# Altium footprint library LimeMicroAltiumLib.PcbLib: 876 footprints (part 33 of 57)
Each footprint in its own frame and in the unit in brackets; x right, y up, seen from the top. Pads: shape width x height; smd on the part's side, far side on the other; paste and mask are expansions set on the pad; w line width, h text height; cw(c..) or ccw(c..) is an arc to the next point about the centre after c.
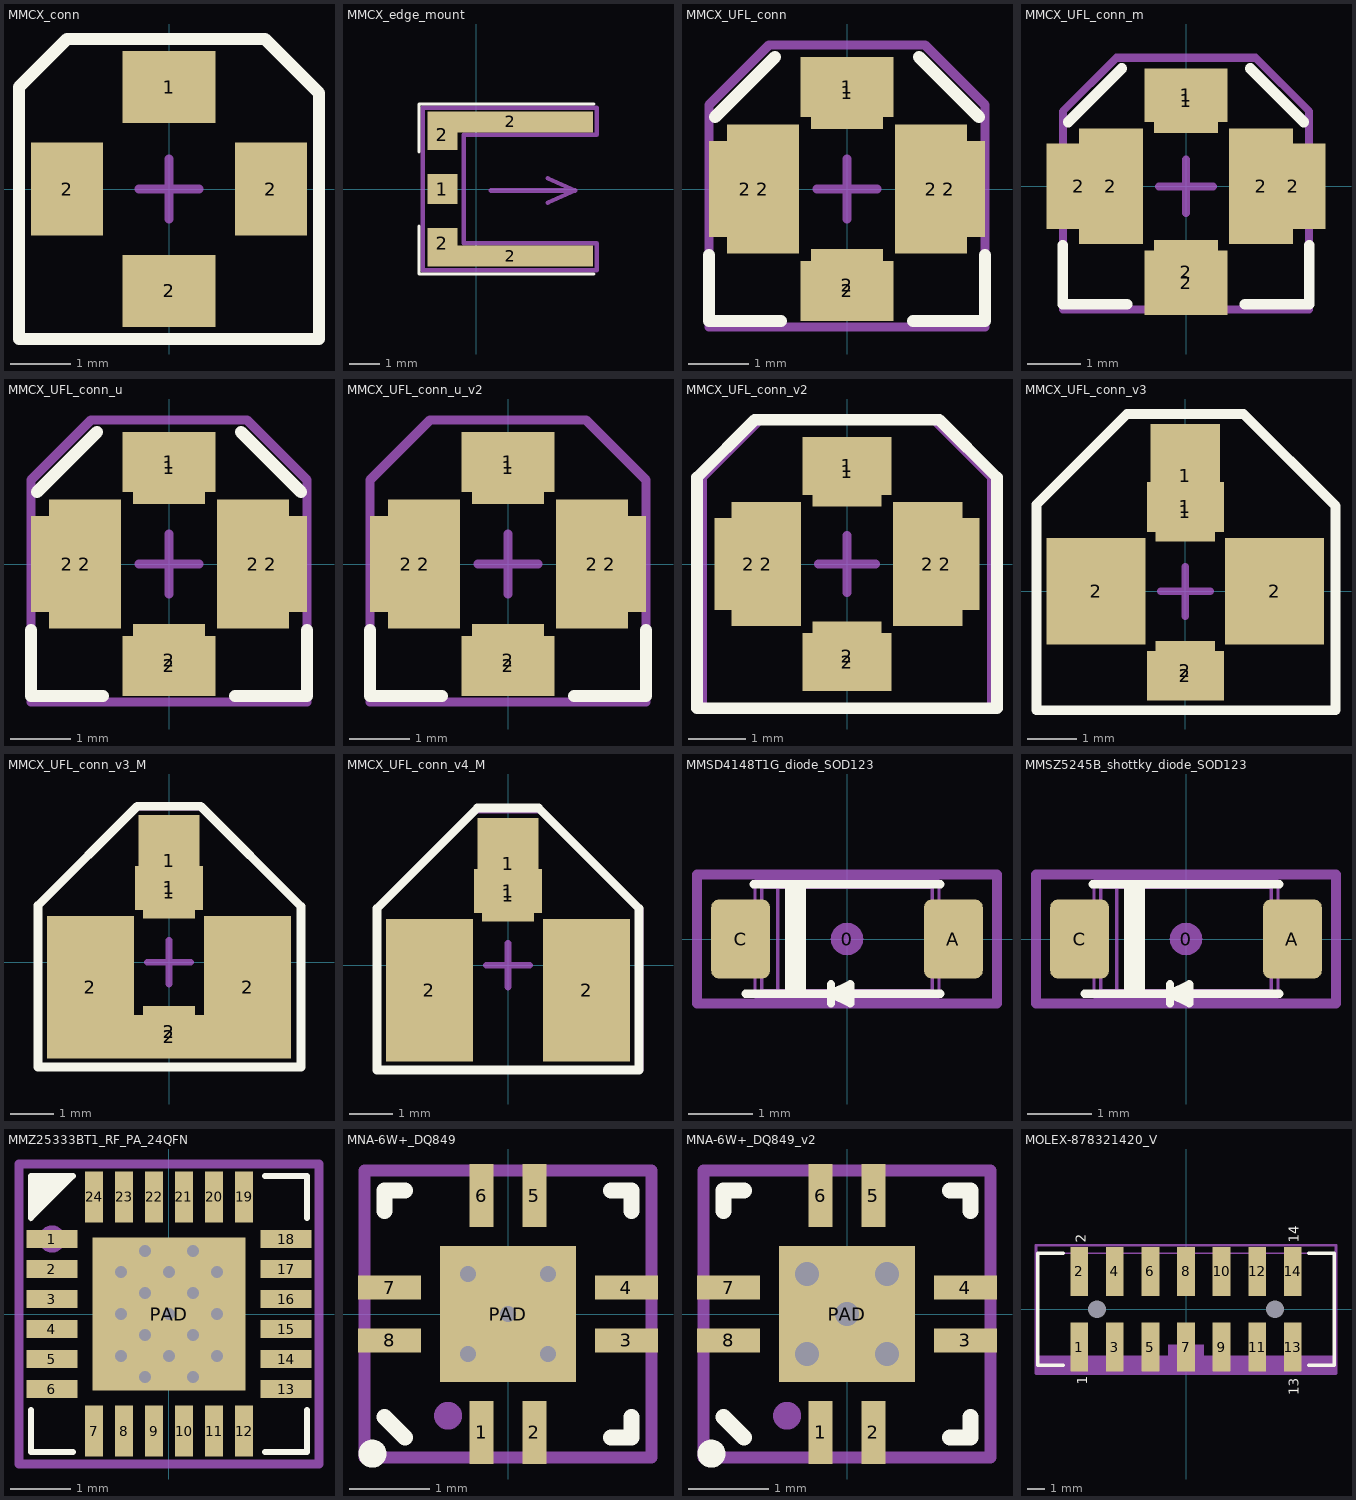
[diagram p32: the footprints below, top view; thin cyan lines are the x and y axes]

## MMCX_conn [mm]
pads (4):
  rect 1.55x1.2 smd: 1(0,1.7) 2(0,-1.7)
  rect 1.2x1.55 smd: 2(-1.7,0) 2(1.7,0)
Top Overlay:
  lines w0.2: -2.5,-2.5 2.5,-2.5 2.5,1.6 1.6,2.5 -1.7,2.5 -2.5,1.7 -2.5,-2.5
Mechanical 15:
  lines w0.15: -0.5,0 0.5,0 ; 0,-0.5 0,0.5 ; -2.5,-2.5 -2.5,1.7 -1.7,2.5 1.6,2.5 2.5,1.6 2.5,-2.5 -2.5,-2.5
  text ".designator" at 0,0 h0.55
  text "in" at -0.4,1.4 h0.4
  text "GND" at -1.3,-0.5 h0.4
  text "GND" at -0.35,-1.675 h0.4
  text "GND" at 1.6,-0.5 h0.4
3D body "User Library-Molex_MMCX_734152061.step": height 5, standoff 0, extent -2.475,-2.475 2.475,2.475

## MMCX_edge_mount [mm]
pads (5):
  rect 1x1 smd mask+0.05: 1(-1.125,0) 2(-1.125,-1.8) 2(-1.125,1.8)
  rect 5.5x0.7 smd mask+0.05: 2(1.125,-2.225) 2(1.125,2.225)
Top Overlay:
  lines w0.1: -1.9,-1.225 -1.9,-2.825 3.9,-2.825 ; -1.9,1.225 -1.9,2.825 3.9,2.825
Mechanical 15:
  lines w0.15: 0.475,-0.05 3.275,-0.05 ; 2.375,-0.45 3.275,-0.05 ; 2.375,0.35 3.275,-0.05 ; -1.775,-2.7 4,-2.7 4,-1.8 -0.425,-1.8 -0.425,1.8 4,1.8 4,2.7 -1.775,2.7 -1.775,-2.7
  text "PCB cutout" at 0.175,1.15 h0.4
  text ".Designator" at -1.15,-0.05 h0.55
  text "in" at -1.1,-0.3 h0.4
  text "GND" at -1.5,-2.5 h0.4
  text "GND" at -1.5,2.1 h0.4
3D body "MMCX_CONN_90.STEP": height 2.1, standoff -1.41, extent -1.6,-2.235 3.85,2.235

## MMCX_UFL_conn [mm]
pads (8):
  rect 1.2x1.2 smd mask+0.05: 1(0,1.6) 2(0,-1.6)
  rect 1.55x1 smd mask+0.05: 1(0,1.7) 2(0,-1.7)
  rect 1.2x1.6 smd mask+0.05: 2(-1.7,0) 2(1.7,0)
  rect 1.2x2.15 smd mask+0.05: 2(-1.4,0) 2(1.4,0)
Top Overlay:
  lines w0.2: -2.3,-1.1 -2.3,-2.2 -1.1,-2.2 ; -2.2,1.2 -1.2,2.2 ; 1.1,-2.2 2.3,-2.2 2.3,-1.1 ; 1.2,2.2 2.2,1.2
Top Solder:
  region: -0.825,1.2 -0.575,1.2 -0.575,0.95 -0.825,0.95
  region: 0.825,1.2 0.575,1.2 0.575,0.95 0.825,0.95
  region: 0.825,-0.95 0.575,-0.95 0.575,-1.2 0.825,-1.2
  region: -0.575,-0.95 -0.825,-0.95 -0.825,-1.2 -0.575,-1.2
Mechanical 15:
  lines w0.15: -0.5,0 0.5,0 ; 0,-0.5 0,0.5 ; -2.3,-2.3 -2.3,1.4 -1.3,2.4 1.3,2.4 2.3,1.4 2.3,-2.3 -2.3,-2.3
  text "GND" at 1.6,-0.5 h0.4
  text "GND" at -0.35,-1.675 h0.4
  text "GND" at -1.3,-0.5 h0.4
  text "in" at -0.4,1.4 h0.4
  text ".designator" at 0,0 h0.55
3D body "User Library-Molex_MMCX_734152061.step": height 5, standoff 0, extent -2.475,-2.475 2.475,2.475
3D body "User Library-U_FL-R-SMT-1.step": height 1.25, standoff -0.01, extent -1.5,-1.55 1.5,1.55

## MMCX_UFL_conn_m [mm]
pads (8):
  rect 1.2x1.2 smd mask+0.05: 1(0,1.6) 2(0,-1.6)
  rect 1.55x1 smd mask+0.05: 1(0,1.7)
  rect 1.2x1.6 smd mask+0.05: 2(-2,0) 2(2,0)
  rect 1.2x2.15 smd mask+0.05: 2(-1.4,0) 2(1.4,0)
  rect 1.55x1.2 smd mask+0.05: 2(0,-1.8)
Top Overlay:
  lines w0.2: -2.3,-1.1 -2.3,-2.2 -1.1,-2.2 ; -2.2,1.2 -1.2,2.2 ; 1.1,-2.2 2.3,-2.2 2.3,-1.1 ; 1.2,2.2 2.2,1.2
Top Solder:
  region: -0.575,-0.95 -0.825,-0.95 -0.825,-1.2 -0.575,-1.2
  region: 0.825,-0.95 0.575,-0.95 0.575,-1.2 0.825,-1.2
  region: 0.825,1.2 0.575,1.2 0.575,0.95 0.825,0.95
  region: -0.825,1.2 -0.575,1.2 -0.575,0.95 -0.825,0.95
Mechanical 15:
  lines w0.15: -0.5,0 0.5,0 ; 0,-0.5 0,0.5 ; -2.3,-2.3 -2.3,1.4 -1.3,2.4 1.3,2.4 2.3,1.4 2.3,-2.3 -2.3,-2.3
  text "GND" at 1.6,-0.5 h0.4
  text "GND" at -0.35,-1.675 h0.4
  text "GND" at -1.3,-0.5 h0.4
  text ".designator" at 0,0 h0.55
  text "in" at -0.4,1.4 h0.4
3D body "908-22101T--3DModel-STEP-56544.STEP": height 3.61, standoff 0, extent -2.134,-2.159 2.184,2.159

## MMCX_UFL_conn_u [mm]
pads (8):
  rect 1.2x1.2 smd mask+0.05: 1(0,1.6) 2(0,-1.6)
  rect 1.55x1 smd mask+0.05: 1(0,1.7) 2(0,-1.7)
  rect 1.2x1.6 smd mask+0.05: 2(-1.7,0) 2(1.7,0)
  rect 1.2x2.15 smd mask+0.05: 2(-1.4,0) 2(1.4,0)
Top Overlay:
  lines w0.2: -2.3,-1.1 -2.3,-2.2 -1.1,-2.2 ; -2.2,1.2 -1.2,2.2 ; 1.1,-2.2 2.3,-2.2 2.3,-1.1 ; 1.2,2.2 2.2,1.2
Top Solder:
  region: -0.575,-0.95 -0.825,-0.95 -0.825,-1.2 -0.575,-1.2
  region: 0.825,-0.95 0.575,-0.95 0.575,-1.2 0.825,-1.2
  region: 0.825,1.2 0.575,1.2 0.575,0.95 0.825,0.95
  region: -0.825,1.2 -0.575,1.2 -0.575,0.95 -0.825,0.95
Mechanical 15:
  lines w0.15: -0.5,0 0.5,0 ; 0,-0.5 0,0.5 ; -2.3,-2.3 2.3,-2.3 2.3,1.4 1.3,2.4 -1.3,2.4 -2.3,1.4 -2.3,-2.3
  text ".designator" at 0,0 h0.55
  text "in" at -0.4,1.4 h0.4
  text "GND" at -1.3,-0.5 h0.4
  text "GND" at -0.35,-1.675 h0.4
  text "GND" at 1.6,-0.5 h0.4
3D body "User Library-U_FL-R-SMT-1.step": height 1.25, standoff -0.01, extent -1.5,-1.55 1.5,1.55

## MMCX_UFL_conn_u_v2 [mm] "Less silkscreen"
pads (8):
  rect 1.2x1.2 smd mask+0.05: 1(0,1.6) 2(0,-1.6)
  rect 1.55x1 smd mask+0.05: 1(0,1.7) 2(0,-1.7)
  rect 1.2x1.6 smd mask+0.05: 2(-1.7,0) 2(1.7,0)
  rect 1.2x2.15 smd mask+0.05: 2(-1.4,0) 2(1.4,0)
Top Overlay:
  lines w0.2: -2.3,-1.1 -2.3,-2.2 -1.1,-2.2 ; 1.1,-2.2 2.3,-2.2 2.3,-1.1
Top Solder:
  region: -0.825,1.2 -0.575,1.2 -0.575,0.95 -0.825,0.95
  region: 0.825,1.2 0.575,1.2 0.575,0.95 0.825,0.95
  region: 0.825,-0.95 0.575,-0.95 0.575,-1.2 0.825,-1.2
  region: -0.575,-0.95 -0.825,-0.95 -0.825,-1.2 -0.575,-1.2
Mechanical 15:
  lines w0.15: -0.5,0 0.5,0 ; 0,-0.5 0,0.5 ; -2.3,-2.3 2.3,-2.3 2.3,1.4 1.3,2.4 -1.3,2.4 -2.3,1.4 -2.3,-2.3
  text ".designator" at 0,0 h0.55
  text "in" at -0.4,1.4 h0.4
  text "GND" at -1.3,-0.5 h0.4
  text "GND" at -0.35,-1.675 h0.4
  text "GND" at 1.6,-0.5 h0.4
3D body "User Library-U_FL-R-SMT-1.step": height 1.25, standoff -0.01, extent -1.5,-1.55 1.5,1.55

## MMCX_UFL_conn_v2 [mm]
pads (8):
  rect 1.2x1.2 smd mask+0.05: 1(0,1.6) 2(0,-1.6)
  rect 1.55x1 smd mask+0.05: 1(0,1.7) 2(0,-1.7)
  rect 1.2x1.6 smd mask+0.05: 2(-1.7,0) 2(1.7,0)
  rect 1.2x2.15 smd mask+0.05: 2(-1.4,0) 2(1.4,0)
Top Overlay:
  lines w0.2: -2.6,-2.5 -2.6,1.5 -1.6,2.5 1.6,2.5 2.6,1.5 2.6,-2.5 -2.6,-2.5
Top Solder:
  region: -0.825,1.2 -0.575,1.2 -0.575,0.95 -0.825,0.95
  region: 0.825,1.2 0.575,1.2 0.575,0.95 0.825,0.95
  region: 0.825,-0.95 0.575,-0.95 0.575,-1.2 0.825,-1.2
  region: -0.575,-0.95 -0.825,-0.95 -0.825,-1.2 -0.575,-1.2
Mechanical 15:
  lines w0.15: -0.5,0 0.5,0 ; 0,-0.5 0,0.5 ; -2.5,-2.5 2.5,-2.5 2.5,1.5 1.5,2.5 -1.5,2.5 -2.5,1.5 -2.5,-2.5
  text ".designator" at 0,0 h0.55
  text "in" at -0.4,1.4 h0.4
  text "GND" at -1.3,-0.5 h0.4
  text "GND" at -0.35,-1.675 h0.4
  text "GND" at 1.6,-0.5 h0.4
3D body "User Library-Molex_MMCX_734152061.step": height 5, standoff 0, extent -2.475,-2.475 2.475,2.475
3D body "User Library-U_FL-R-SMT-1.step": height 1.25, standoff -0.01, extent -1.5,-1.55 1.5,1.55

## MMCX_UFL_conn_v3 [mm]
pads (7):
  rect 1.2x1.2 smd mask+0.05: 1(0,1.6) 2(0,-1.6)
  rect 1.55x1 smd mask+0.05: 1(0,1.7) 2(0,-1.7)
  rect 1.4x2.1 smd mask+0.05: 1(0,2.325)
  rect 2x2.15 smd mask+0.05: 2(-1.8,0) 2(1.8,0)
Top Overlay:
  lines w0.2: -3,-2.4 3.025,-2.4 3.025,1.725 1.175,3.575 -1.175,3.575 -3,1.75 -3,-2.4
Top Solder:
  region: -0.825,1.2 -0.575,1.2 -0.575,0.95 -0.825,0.95
  region: 0.825,1.2 0.575,1.2 0.575,0.95 0.825,0.95
  region: 0.825,-0.95 0.575,-0.95 0.575,-1.2 0.825,-1.2
  region: -0.575,-0.95 -0.825,-0.95 -0.825,-1.2 -0.575,-1.2
Mechanical 15:
  lines w0.15: -0.5,0 0.5,0 ; 0,-0.5 0,0.5 ; -3,-2.4 -3,1.75 -1.2,3.55 1.2,3.55 3.025,1.725 3.025,-2.4 -3,-2.4
  text "GND" at 1.6,-0.5 h0.4
  text "GND" at -0.35,-1.675 h0.4
  text "GND" at -1.3,-0.5 h0.4
  text "in" at -0.4,1.4 h0.4
  text ".designator" at 0,0 h0.55
3D body "12078.stp": height 5, standoff 0, extent -2.5,-1.55 2.5,3.45
3D body "User Library-U_FL-R-SMT-1.step": height 1.25, standoff -0.01, extent -1.5,-1.55 1.5,1.55
3D body "User Library-Molex_MMCX_734152061.step": height 5, standoff 0, extent -2.475,-2.475 2.475,2.475

## MMCX_UFL_conn_v3_M [mm]
pads (7):
  rect 1.2x1.2 smd mask+0.05: 1(0,1.6) 2(0,-1.6)
  rect 1.55x1 smd mask+0.05: 1(0,1.7)
  rect 1.4x2.1 smd mask+0.05: 1(0,2.325)
  rect 2x3.275 smd mask+0.05: 2(-1.8,-0.575) 2(1.8,-0.575)
  rect 1.6x1 smd mask+0.05: 2(0,-1.713)
Top Overlay:
  lines w0.2: -3,-2.4 -3,1.3 -0.725,3.575 0.725,3.575 3.025,1.275 3.025,-2.4 -3,-2.4
Top Solder:
  region: -0.575,-0.95 -0.825,-0.95 -0.825,-1.2 -0.575,-1.2
  region: 0.825,-0.95 0.575,-0.95 0.575,-1.2 0.825,-1.2
  region: 0.825,1.2 0.575,1.2 0.575,0.95 0.825,0.95
  region: -0.825,1.2 -0.575,1.2 -0.575,0.95 -0.825,0.95
Mechanical 15:
  lines w0.15: -0.5,0 0.5,0 ; 0,-0.5 0,0.5 ; -3,-2.4 3.025,-2.4 3.025,1.275 0.75,3.55 -0.75,3.55 -3,1.3 -3,-2.4
  text "GND" at 1.6,-0.5 h0.4
  text "GND" at -0.35,-1.675 h0.4
  text "GND" at -1.3,-0.5 h0.4
  text "in" at -0.4,1.4 h0.4
  text ".designator" at 0,0 h0.55
3D body "12078.stp": height 5, standoff 0, extent -2.5,-2.425 2.5,2.575

## MMCX_UFL_conn_v4_M [mm]
pads (5):
  rect 1.2x1.2 smd mask+0.05: 1(0,1.6)
  rect 1.55x1 smd mask+0.05: 1(0,1.7)
  rect 1.4x2.1 smd mask+0.05: 1(0,2.325)
  rect 2x3.275 smd mask+0.05: 2(-1.8,-0.575) 2(1.8,-0.575)
Top Overlay:
  lines w0.2: -3,-2.4 0,-2.4 3,-2.4 3,1.3 0.7,3.6 -0.7,3.6 -3,1.3 -3,-2.4
Top Solder:
  region: 0.825,1.2 0.575,1.2 0.575,0.95 0.825,0.95
  region: -0.825,1.2 -0.575,1.2 -0.575,0.95 -0.825,0.95
Mechanical 15:
  lines w0.15: -0.5,0 0.5,0 ; 0,-0.5 0,0.5 ; -3,-2.4 3.025,-2.4 3.025,1.275 0.75,3.55 -0.75,3.55 -3,1.3 -3,-2.4
  text ".designator" at 0,0 h0.55
  text "in" at -0.4,1.4 h0.4
  text "GND" at -1.3,-0.5 h0.4
  text "GND" at 1.6,-0.5 h0.4
3D body "12078.stp": height 5, standoff 0, extent -2.5,-2.425 2.5,2.575

## MMSD4148T1G_diode_SOD123 [mm]
height 1.15
pads (3):
  round 0.508 on Mech15: 0(0,0)
  rrect25% 0.91x1.22 smd: A(1.65,0) C(-1.65,0)
Top Overlay:
  lines w0.127: -1.575,-0.85 1.448,-0.85 ; -1.45,0.85 1.45,0.85 ; -0.9,-0.85 -0.9,0.85 ; -0.8,-0.85 -0.8,0.85 ; -0.7,-0.85 -0.7,0.85 ; -0.25,-1 -0.25,-0.7 ; 0.05,-0.85 -0.25,-0.85 ; -0.25,-0.85 0.05,-0.7 0.05,-1 -0.25,-0.85
Mechanical 13:
  lines w0.05: -1.766,-0.308 -1.766,0.308 ; -1.707,-0.308 -1.707,0.308 ; -1.517,-0.308 -1.517,0.308 ; -1.425,-0.308 -1.95,-0.308 -1.95,0.308 -1.425,0.308 ; 0.075,-0.9 0.177,-0.798 ; 1.425,-0.308 1.95,-0.308 1.95,0.308 1.425,0.308 ; 1.517,-0.308 1.517,0.308 ; 1.707,-0.308 1.707,0.308 ; 1.766,-0.308 1.766,0.308 ; -1.425,0.9 -1.425,-0.9 1.425,-0.9 ; -1.425,0.9 1.425,0.9 ; -1.425,0.9 -1.323,0.798 ; -1.323,0.798 -1.323,-0.798 -1.072,-0.798 ; -1.323,0.798 -1.072,0.798 ; -1.072,-0.798 -1.072,0.798 ; -1.072,-0.798 1.322,-0.797 ; -1.072,0.798 1.322,0.797 ; 1.322,-0.797 1.425,-0.9 ; 1.322,-0.797 1.322,0.797 ; 1.322,0.797 1.425,0.9 ; 1.425,-0.9 1.425,0.9
Mechanical 15:
  lines w0.15: -2.325,-1 -2.325,1 2.325,1 2.325,-1 -2.325,-1
  text ".Designator" at 0,0 h0.55
  text "C" at -1.9,-0.275 h0.55
  text "A" at 1.475,-0.275 h0.55
3D body "SOD123.STEP": height 1.18, standoff 0, extent -1.95,-0.9 1.95,0.9

## MMSZ5245B_shottky_diode_SOD123 [mm]
height 1.15
pads (3):
  round 0.508 on Mech15: 0(0,0)
  rrect25% 0.91x1.22 smd: A(1.65,0) C(-1.65,0)
Top Overlay:
  lines w0.127: -1.575,-0.85 1.448,-0.85 ; -1.45,0.85 1.45,0.85 ; -0.9,-0.85 -0.9,0.85 ; -0.8,-0.85 -0.8,0.85 ; -0.7,-0.85 -0.7,0.85 ; -0.25,-1 -0.25,-0.7 ; 0.05,-0.85 -0.25,-0.85 ; -0.25,-0.85 0.05,-0.7 0.05,-1 -0.25,-0.85
Mechanical 13:
  lines w0.05: -1.766,-0.308 -1.766,0.308 ; -1.707,-0.308 -1.707,0.308 ; -1.517,-0.308 -1.517,0.308 ; -1.425,-0.308 -1.95,-0.308 -1.95,0.308 -1.425,0.308 ; 0.075,-0.9 0.177,-0.798 ; 1.425,-0.308 1.95,-0.308 1.95,0.308 1.425,0.308 ; 1.517,-0.308 1.517,0.308 ; 1.707,-0.308 1.707,0.308 ; 1.766,-0.308 1.766,0.308 ; -1.425,0.9 -1.425,-0.9 1.425,-0.9 ; -1.425,0.9 1.425,0.9 ; -1.425,0.9 -1.323,0.798 ; -1.323,0.798 -1.323,-0.798 -1.072,-0.798 ; -1.323,0.798 -1.072,0.798 ; -1.072,-0.798 -1.072,0.798 ; -1.072,-0.798 1.322,-0.797 ; -1.072,0.798 1.322,0.797 ; 1.322,-0.797 1.425,-0.9 ; 1.322,-0.797 1.322,0.797 ; 1.322,0.797 1.425,0.9 ; 1.425,-0.9 1.425,0.9
Mechanical 15:
  lines w0.15: -2.325,-1 -2.325,1 2.325,1 2.325,-1 -2.325,-1
  text ".Designator" at 0,0 h0.55
  text "C" at -1.9,-0.275 h0.55
  text "A" at 1.475,-0.275 h0.55
3D body "SOD123.STEP": height 1.18, standoff 0, extent -1.95,-0.9 1.95,0.9

## MMZ25333BT1_RF_PA_24QFN [mm]
pads (25):
  rect 0.85x0.3 smd mask+0.05: 1(-1.95,1.25) 2(-1.95,0.75) 3(-1.95,0.25) 4(-1.95,-0.25) 5(-1.95,-0.75) 6(-1.95,-1.25) 13(1.95,-1.25) 14(1.95,-0.75) 15(1.95,-0.25) 16(1.95,0.25) 17(1.95,0.75) 18(1.95,1.25)
  rect 0.3x0.85 smd mask+0.05: 7(-1.25,-1.95) 8(-0.75,-1.95) 9(-0.25,-1.95) 10(0.25,-1.95) 11(0.75,-1.95) 12(1.25,-1.95) 19(1.25,1.95) 20(0.75,1.95) 21(0.25,1.95) 22(-0.25,1.95) 23(-0.75,1.95) 24(-1.25,1.95)
  rect 2.55x2.55 smd mask+0.05: PAD(0,0)
via 0.4,-0.35 diameter 0.4 hole 0.2
via 0.4,0.35 diameter 0.4 hole 0.2
via 0.4,1.05 diameter 0.4 hole 0.2
via 0.4,-1.05 diameter 0.4 hole 0.2
via 0.8,0.7 diameter 0.4 hole 0.2
via 0.8,-0.7 diameter 0.4 hole 0.2
via 0.8,0 diameter 0.4 hole 0.2
via -0.8,0 diameter 0.4 hole 0.2
via -0.8,-0.7 diameter 0.4 hole 0.2
via -0.8,0.7 diameter 0.4 hole 0.2
via -0.4,-1.05 diameter 0.4 hole 0.2
via -0.4,1.05 diameter 0.4 hole 0.2
via -0.4,0.35 diameter 0.4 hole 0.2
via 0,0.7 diameter 0.4 hole 0.2
via 0,-0.7 diameter 0.4 hole 0.2
via -0.4,-0.35 diameter 0.4 hole 0.2
via 0,0 diameter 0.4 hole 0.2
Top Overlay:
  region: -2.3,1.55 -1.55,2.3 -2.3,2.3
  lines w0.1: -2.3,-1.6 -2.3,-2.3 -1.6,-2.3 ; 1.6,-2.3 2.3,-2.3 2.3,-1.6 ; 1.6,2.3 2.3,2.3 2.3,1.6 ; -2.3,1.6 -2.3,2.3 -1.6,2.3 -2.3,1.6
Mechanical 15:
  circle w0.25: c-1.95,1.25 r0.1
  lines w0.15: -0.5,0 0.5,0 ; 0,-0.5 0,0.5 ; -2.5,-2.5 2.5,-2.5 2.5,2.5 -2.5,2.5 -2.5,-2.5
  text ".Designator" at 0,0 h0.55
3D body "User Library-QFN 24 4x4.step": height 0.9, standoff 0, extent -2.002,-2.002 2.002,2.002

## MNA-6W+_DQ849 [mm] "Quad Flat No Lead, Plastic; 16 Terminals; Body 3 x 3 mm; Pitch 0.5 mm"
height 0.8
pads (9):
  rect 0.3x0.79 smd mask+0.05: 1(-0.33,-1.485) 2(0.33,-1.485) 5(0.33,1.485) 6(-0.33,1.485)
  rect 0.79x0.3 smd mask+0.05: 3(1.485,-0.33) 4(1.485,0.33) 7(-1.485,0.33) 8(-1.485,-0.33)
  rect 1.7x1.7 smd mask+0.05: PAD(0,0)
via -0.5,-0.5 diameter 0.5 hole 0.2
via 0.5,-0.5 diameter 0.5 hole 0.2
via 0.5,0.5 diameter 0.5 hole 0.2
via -0.5,0.5 diameter 0.5 hole 0.2
via 0,0 diameter 0.5 hole 0.2
Top Overlay:
  circle w0.25: c-1.7,-1.75 r0.05
  lines w0.2: -1.55,-1.29 -1.29,-1.55 ; -1.55,1.29 -1.55,1.55 -1.29,1.55 ; 1.29,-1.55 1.55,-1.55 1.55,-1.29 ; 1.29,1.55 1.55,1.55 1.55,1.29
Mechanical 15:
  circle w0.3: c-0.75,-1.275 r0.025
  lines w0.15: -0.475,0 0,0 ; 0,-0.475 0,0 ; 0,0.475 0,0 ; 0.475,0 0,0 ; -1.8,-1.8 1.8,-1.8 1.8,1.8 -1.8,1.8 -1.8,-1.8
  text ".Designator" at 0,0 h0.55
3D body "User Library-QFN16-1.step": height 0.89, standoff 0, extent -1.55,-1.55 1.55,1.55

## MNA-6W+_DQ849_v2 [mm] "Quad Flat No Lead, Plastic; 16 Terminals; Body 3 x 3 mm; Pitch 0.5 mm"
height 0.8
pads (9):
  rect 0.3x0.79 smd mask+0.05: 1(-0.33,-1.485) 2(0.33,-1.485) 5(0.33,1.485) 6(-0.33,1.485)
  rect 0.79x0.3 smd mask+0.05: 3(1.485,-0.33) 4(1.485,0.33) 7(-1.485,0.33) 8(-1.485,-0.33)
  rect 1.7x1.7 smd mask+0.05: PAD(0,0)
via 0,0 diameter 0.5 hole 0.3
via -0.5,0.5 diameter 0.5 hole 0.3
via 0.5,0.5 diameter 0.5 hole 0.3
via 0.5,-0.5 diameter 0.5 hole 0.3
via -0.5,-0.5 diameter 0.5 hole 0.3
Top Overlay:
  circle w0.25: c-1.7,-1.75 r0.05
  lines w0.2: -1.55,-1.29 -1.29,-1.55 ; -1.55,1.29 -1.55,1.55 -1.29,1.55 ; 1.29,-1.55 1.55,-1.55 1.55,-1.29 ; 1.29,1.55 1.55,1.55 1.55,1.29
Mechanical 15:
  circle w0.3: c-0.75,-1.275 r0.025
  lines w0.15: -0.475,0 0,0 ; 0,-0.475 0,0 ; 0,0.475 0,0 ; 0.475,0 0,0 ; -1.8,-1.8 -1.8,1.8 1.8,1.8 1.8,-1.8 -1.8,-1.8
  text ".Designator" at 0,0 h0.55
3D body "User Library-QFN16-1.step": height 0.89, standoff 0, extent -1.55,-1.55 1.55,1.55

## MOLEX-878321420_V [mm] "SMD, 14-Leads, Body 16.65x6.3mm, Pitch 2mm"
height 7.6
pads (16):
  rect 1x2.75 smd: 1(-6,-2.125) 2(-6,2.125) 3(-4,-2.125) 4(-4,2.125) 5(-2,-2.125) 6(-2,2.125) 7(0,-2.125) 8(0,2.125) 9(2,-2.125) 10(2,2.125) 11(4,-2.125) 12(4,2.125) 13(6,-2.125) 14(6,2.125)
  round 0.5 hole 1 unplated: MH1(-5,0) MH2(5,0)
Top Overlay:
  lines w0.2: -6.9,-3.15 -8.325,-3.15 -8.325,3.15 -6.9,3.15 ; 6.9,-3.15 8.325,-3.15 8.325,3.15 6.9,3.15
  text "1" at -5.55,-4.225 h0.55
  text "2" at -5.625,3.75 h0.55
  text "14" at 6.325,3.75 h0.55
  text "13" at 6.325,-4.825 h0.55
Mechanical 13:
  lines w0.1: -8.325,-3.15 -8.325,3.15 8.325,3.15 8.325,-3.15 -8.325,-3.15
Mechanical 15:
  region: -8.425,-3.6 -8.425,-2.6 8.425,-2.6 8.425,-3.6
  region: -1,-2.6 -1,-2 1,-2 1,-2.6
  lines w0.15: -8.425,-3.6 -8.425,3.6 8.425,3.6 8.425,-3.6 -8.425,-3.6
  text "1" at -6.1,-2.2 h0.55
  text ".Designator" at 0,0 h0.55
3D body "878321420.stp": height 7.6, standoff -0.75, extent -8.325,-3.15 8.325,3.15